# Altium schematic symbol library CRM2512-JW-103ELF.SchLib: 1 symbol
Pins are listed as number, name and electrical type; pins without a type are passive.

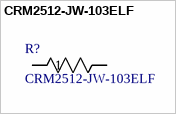
[diagram p0: symbol CRM2512-JW-103ELF]

## CRM2512-JW-103ELF
designator R?
No Description Available; Manufacturer_Name: Bourns Electronics; Copyright: Copyright (C) 2026 Ultra Librarian. All rights reserved.; Manufacturer_Part_Number: CRM2512-JW-103ELF
footprint BO_CR2512
pins: 1, 2